# Altium schematic symbol library Transistor.SchLib: 61 symbols (part 2 of 2)
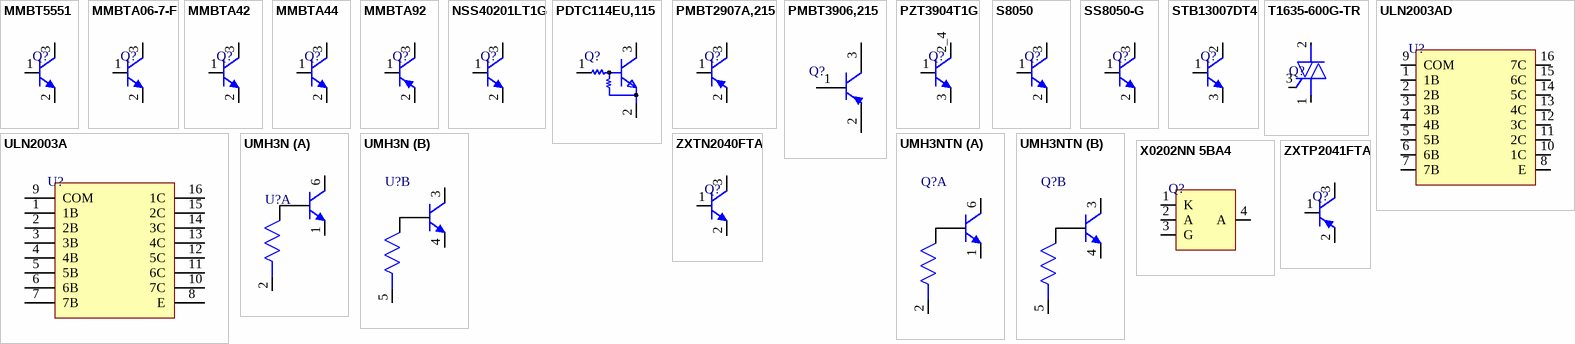
[diagram p2: symbols MMBT5551 to ZXTP2041FTA]

## MMBT5551
designator Q?
TRANS NPN 160V 0.6A SOT-23; Manufacturer: ON Semiconductor; Manufacturer Part Number: MMBT5551LT1G; Max Power Dissipation: 225mW; Max Collector Current: 600mA; Collector Base Voltage (VCBO): 180V; Emitter Base Voltage (VEBO): 6V; Element Configuration: Single; hFE Min: 80; Power Dissipation: 300mW; Number of Elements: 1; Collector Emitter Saturation Voltage: 150mV; Collector-emitter Voltage-Max: 200mV; Item Type: Transister; Supplier 1: Digi-Key; RoHS: Yes; Category: BJTs; Pricing 1: 1=0.22000, 10=0.17700, 100=0.09370, 500=0.06162, 1000=0.04190 (USD); Case/Package: SOT-23-3; Number of Pins: 3; Weight: 0.01lb; Contact Plating: Tin,Matte; Min Operating Temperature: -55°C; Max Operating Temperature: 150°C; Packaging: Tape and Reel; Collector Emitter Voltage (VCEO): 160V; Polarity: NPN; Package Quantity: 1; Collector Emitter Breakdown Voltage: 160V; Current Rating: 600mA; Voltage Rating (DC): 160V; Max Breakdown Voltage: 160V; Series: -; Length: 2.9mm; Width: 1.3mm; Height: 0.94mm; Radiation Hardening: No; Lead Free: Lead Free; REACH SVHC: No SVHC; RoHS Compliant: Yes; Supplier Part Number 1: MMBT5551LT1GOSDKR-ND; LCSC Part Number: C909756; ComponentLink14Description: LCSC; ComponentLink14URL: https://www.lcsc.com/product-detail/Bipolar-Transistors-BJT_Jiangsu-Changjing-Electronics-Technology-Co-Ltd-MMBT5551_C2145.html
footprint SOT-23 (TRANS NPN 40V 0.6A SOT23)
pins: 1 B, 2 E, 3 C

## MMBTA06-7-F
designator Q?
TRANS NPN 80V 0.5A SOT23-3; Manufacturer: Diodes; Manufacturer Part Number: MMBTA06-7-F; Item Type: BJTs; Current Rating: 500mA; Supplier: Future Electronics; LCSC Part Number: C151597; RoHS: Yes; Stock: 573000; Pricing: 3000=0.021, 9000=0.0202, 30000=0.0194, 60000=0.019, 120000=0.0182 (USD); Voltage Rating (DC): 80V; Lead Free: 5697LeadFree; ComponentLink1URL: https://datasheet.ciiva.com/19482/1540800-19482686.pdf?src-supplier=Jameco; ComponentLink1Description: https://datasheet.ciiva.com/19482/1540800-19482686.pdf?src-supplier=Jameco; ComponentLink2URL: https://datasheet.ciiva.com/15139/getdatasheetpartid-116057-15139325.pdf?src-supplier=Verical; ComponentLink2Description: https://datasheet.ciiva.com/15139/getdatasheetpartid-116057-15139325.pdf?src-supplier=Verical; ComponentLink3URL: https://datasheet.ciiva.com/972/ds30037-972971.pdf?src-supplier=Digikey; ComponentLink3Description: https://datasheet.ciiva.com/972/ds30037-972971.pdf?src-supplier=Digikey; ComponentLink4URL: https://datasheet.ciiva.com/972/ds30037-972972.pdf?src-supplier=Digikey; ComponentLink4Description: https://datasheet.ciiva.com/972/ds30037-972972.pdf?src-supplier=Digikey; ComponentLink5URL: https://datasheet.ciiva.com/972/ds30037-972973.pdf?src-supplier=Digikey; ComponentLink5Description: https://datasheet.ciiva.com/972/ds30037-972973.pdf?src-supplier=Digikey; ComponentLink6URL: https://datasheet.ciiva.com/11197/ds30037-11197413.pdf?src-supplier=Avnet; ComponentLink6Description: https://datasheet.ciiva.com/11197/ds30037-11197413.pdf?src-supplier=Avnet; ComponentLink7URL: https://datasheet.ciiva.com/4723/ds30037-4723212.pdf?src-supplier=Mouser; ComponentLink7Description: https://datasheet.ciiva.com/4723/ds30037-4723212.pdf?src-supplier=Mouser; ComponentLink8URL: https://datasheet.ciiva.com/22711/1915521-22711756.pdf?src-supplier=Element14; ComponentLink8Description: https://datasheet.ciiva.com/22711/1915521-22711756.pdf?src-supplier=Element14; ComponentLink9URL: https://datasheet.ciiva.com/16298/ds30037-16298441.pdf?src-supplier=Future+Electronics; ComponentLink9Description: https://datasheet.ciiva.com/16298/ds30037-16298441.pdf?src-supplier=Future+Electronics
footprint SOT-23 (TRANS NPN 40V 0.6A SOT23)
pins: 1 B, 2 E, 3 C

## MMBTA42
designator Q?
300V 350mW 100@10mA,10V 300mA NPN SOT-23 Bipolar Transistors - BJT ROHS; Manufacturer: Guangdong Hottech; Manufacturer Part Number: MMBTA42; Package: SOT-23; LCSC Part Number: C181172; Item Type: Transistor; ComponentLink1Description: LCSC; ComponentLink1URL: https://www.lcsc.com/product-detail/Bipolar-Transistors-BJT_Guangdong-Hottech-MMBTA42_C181172.html
footprint SOT-23 (TRANS NPN 40V 0.6A SOT23)
pins: 1 B, 2 E, 3 C

## MMBTA44
designator Q?
400V 350mW 300mA NPN SOT-23 Bipolar Transistors - BJT ROHS; Manufacturer: Foshan; Manufacturer Part Number: MMBTA44; Package: SOT-23; ComponentLink1Description: LCSC; ComponentLink1URL: https://lcsc.com/product-detail/Bipolar-Transistors-BJT_Foshan-Blue-Rocket-Elec-MMBTA44_C305465.html; LCSC Part Number: C9991
footprint sot-23
pins: 1 B, 2 E, 3 C

## MMBTA92
designator Q?
300V 300mW 100@10mA,10V 200mA PNP SOT-23 Bipolar Transistors - BJT ROHS; Manufacturer: Jiangsu; Manufacturer Part Number: MMBTA92; Package: SOT-23; LCSC Part Number: C8516; Item Type: Transistor; ComponentLink1Description: LCSC; ComponentLink1URL: https://www.lcsc.com/product-detail/Bipolar-Transistors-BJT_Jiangsu-Changjing-Electronics-Technology-Co-Ltd-MMBTA92_C8516.html
footprint SOT-23 (TRANS NPN 40V 0.6A SOT23)
pins: 1 B, 2 E, 3 C

## NSS40201LT1G
designator Q?
TRANS NPN 40V 2A SOT23-3; Manufacturer: ON Semiconductor; Manufacturer Part Number: NSS40201LT1G; Max Power Dissipation: 540mW; Transition Frequency: 150MHz; hFE Min: 200; Number of Elements: 1; Emitter Base Voltage (VEBO): 6V; Collector Emitter Saturation Voltage: 115mV; Element Configuration: Single; Clock Frequency: 100MHz; Item Type: Transistor; Supplier 1: Future Electronics; RoHS: Yes; Category: BJTs; Stock 1: 155; Pricing 1: 1=0.42000, 15=0.34000, 75=0.29500, 300=0.25500, 1500=0.21000 (USD); Case/Package: SOT-23-3; Pins: 3; Min Operating Temperature: -55°C; Max Operating Temperature: 150°C; Collector Emitter Voltage (VCEO): 40V; Packaging: Tape and Reel; Max Collector Current: 2A; Collector Emitter Breakdown Voltage: 40V; Polarity: NPN; Package Quantity: 3000; Frequency: 150MHz; Max Breakdown Voltage: 40V; Collector Base Voltage (VCBO): 40V; Power Dissipation: 540mW; Gain Bandwidth Product: 150MHz; Series: -; Collector-emitter Voltage-Max: 115mV; Length: 3.04mm; Width: 2.64mm; Height: 1.11mm; Radiation Hardening: No; Lead Free: Lead Free; Reach SVHC Compliant: Yes; Halogen Free: Halogen Free; RoHS Compliant: Yes; ComponentLink1URL: https://datasheet.ciiva.com/976/nss40201l-d-976800.pdf?src-supplier=Digi-Key; ComponentLink1Description: https://datasheet.ciiva.com/976/nss40201l-d-976800.pdf?src-supplier=Digi-Key; ComponentLink2URL: https://datasheet.ciiva.com/11204/nss40201l-d-11204882.pdf?src-supplier=Avnet; ComponentLink2Description: https://datasheet.ciiva.com/11204/nss40201l-d-11204882.pdf?src-supplier=Avnet; ComponentLink3URL: https://datasheet.ciiva.com/16291/nss40201l-d-115376-16291797.pdf?src-supplier=Mouser; ComponentLink3Description: https://datasheet.ciiva.com/16291/nss40201l-d-115376-16291797.pdf?src-supplier=Mouser; ComponentLink4URL: https://datasheet.ciiva.com/30480/0900766b8121b5a5-30480502.pdf?src-supplier=Rs; ComponentLink4Description: https://datasheet.ciiva.com/30480/0900766b8121b5a5-30480502.pdf?src-supplier=Rs; ComponentLink5URL: https://datasheet.ciiva.com/976/nss40201l-d-976801.pdf?src-supplier=Digi-Key; ComponentLink5Description: https://datasheet.ciiva.com/976/nss40201l-d-976801.pdf?src-supplier=Digi-Key; ComponentLink6URL: https://datasheet.ciiva.com/976/nss40201l-d-976802.pdf?src-supplier=Digi-Key; ComponentLink6Description: https://datasheet.ciiva.com/976/nss40201l-d-976802.pdf?src-supplier=Digi-Key; ComponentLink7URL: https://datasheet.ciiva.com/22641/nss40201l-d-22641179.pdf?src-supplier=Farnell; ComponentLink7Description: https://datasheet.ciiva.com/22641/nss40201l-d-22641179.pdf?src-supplier=Farnell; ComponentLink8URL: https://datasheet.ciiva.com/16222/nss40201l-d-16222093.pdf?src-supplier=Future+Electronics; ComponentLink8Description: https://datasheet.ciiva.com/16222/nss40201l-d-16222093.pdf?src-supplier=Future+Electronics; Supplier Part Number 1: 6030674; LCSC Part Number: C145175
footprint SOT-23 (TRANS NPN 40V 0.6A SOT23)
pins: 1 B, 2 E, 3 C

## PDTC114EU,115
designator Q?
TRANS PREBIAS NPN 50V SOT323; Manufacturer: Nexperia; Manufacturer Part Number: PDTC114EU,115; Item Type: BJTs; Polarity: 5054Direction; Collector Emitter Saturation Voltage: 150mV; Emitter Base Voltage (VEBO): 10V; Max Collector Current: 100mA; hFE Min: 30NUMBER; Number of Elements: 1NUMBER; Power Dissipation: 200mW; Supplier: Digikey; LCSC Part Number: C135830; RoHS: Yes; Stock: 130263; Pricing: 1=0.17, 10=0.101, 100=0.0624, 500=0.0453, 1000=0.03974 (USD); Pins: 3NUMBER; Max Operating Temperature: 150°C; Collector Emitter Voltage (VCEO): 50V; Collector Base Voltage (VCBO): 50V; Height: 1.1mm; ComponentLink1URL: http://www.farnell.com/datasheets/1511870.pdf?src-supplier=Farnell; ComponentLink1Description: http://www.farnell.com/datasheets/1511870.pdf?src-supplier=Farnell; ComponentLink2URL: https://datasheet.octopart.com/PDTC114EU%2C115-NXP-datasheet-539707.pdf?src-supplier=Future+Electronics; ComponentLink2Description: https://datasheet.octopart.com/PDTC114EU%2C115-NXP-datasheet-539707.pdf?src-supplier=Future+Electronics; ComponentLink3URL: https://assets.nexperia.com/documents/data-sheet/PDTC114E_SER.pdf?src-supplier=Digikey; ComponentLink3Description: https://assets.nexperia.com/documents/data-sheet/PDTC114E_SER.pdf?src-supplier=Digikey; ComponentLink4URL: https://datasheet.octopart.com/PDTC114EU%2C115-Nexperia-datasheet-24570111.pdf?src-supplier=Newark; ComponentLink4Description: https://datasheet.octopart.com/PDTC114EU%2C115-Nexperia-datasheet-24570111.pdf?src-supplier=Newark
footprint SOT-323-3
pins: 1 B, 2 E, 3 C

## PMBT2907A,215
designator Q?
TRANS PNP 60V 0.6A TO236AB; Manufacturer: Nexperia; Manufacturer Part Number: PMBT2907A,215; Collector Emitter Voltage (VCEO): -60V; Emitter Base Voltage (VEBO): -5V; Max Collector Current: -600mA; Polarity: 5054,5055Direction; Collector Emitter Saturation Voltage: -1.6V; hFE Min: 100NUMBER; Number of Elements: 1NUMBER; Power Dissipation: 250mW; Item Type: (BJT); Supplier: Arrow Electronics; LCSC Part Number: C8665; RoHS: Yes; Category: BJTs; Stock: 441000; Pricing: 3000=0.018, 9000=0.017, 24000=0.016, 45000=0.015 (USD); Pins: 3NUMBER; Max Operating Temperature: 150°C; Collector Base Voltage (VCBO): -60V; Packaging: 10Packaging; Height: 1.1mm; ComponentLink1URL: https://media.digikey.com/pdf/Data%20Sheets/NXP%20PDFs/PMBT2907(A).pdf?src-supplier=Digikey; ComponentLink1Description: https://media.digikey.com/pdf/Data%20Sheets/NXP%20PDFs/PMBT2907(A).pdf?src-supplier=Digikey; ComponentLink2URL: http://www.farnell.com/datasheets/1914007.pdf?src-supplier=Farnell; ComponentLink2Description: http://www.farnell.com/datasheets/1914007.pdf?src-supplier=Farnell; ComponentLink3URL: https://datasheet.octopart.com/PMBT2907A%2C215-Nexperia-datasheet-87581832.pdf?src-supplier=Future+Electronics; ComponentLink3Description: https://datasheet.octopart.com/PMBT2907A%2C215-Nexperia-datasheet-87581832.pdf?src-supplier=Future+Electronics; ComponentLink4URL: https://datasheet.octopart.com/PMBT2907A%2C215-Nexperia-datasheet-38276499.pdf?src-supplier=Newark; ComponentLink4Description: https://datasheet.octopart.com/PMBT2907A%2C215-Nexperia-datasheet-38276499.pdf?src-supplier=Newark
footprint SOT-23 (TRANS NPN 40V 0.6A SOT23)
pins: 1 B, 2 E, 3 C

## PMBT3906,215
designator Q?
50nA 40V 250mW 100@10mA,1V 200mA 250MHz 400mV@50mA,5mA PNP +150℃@(Tj) SOT-23 Bipolar Transistors - BJT ROHS; Manufacturer: Nexperia; Manufacturer Part Number: PMBT3906,215; Package Body Material: Plastic; Transistor Element Material: SILICON; Collector-base Capacitance-Max: 4.5pF; DC Current Gain-Min (hFE): 30; Number of Elements: 1; Time @ Peak Reflow Temperature-Max (s): 40s; Transistor Application: SWITCHING; Turn-off Time-Max (toff): 300ns; Turn-on Time-Max (ton): 70ns; VCEsat-Max: 650mV; Reference Standard: IEC-60134; JEDEC-95 Code: TO-236AB; Qualification Status: Not Qualified; Supplier 1: Arrow Electronics; RoHS: Yes; Category: BJTs; Stock 1: 1869000; Pricing 1: 3000=0.01910, 6000=0.01620, 12000=0.01260 (USD); Pins: 3; Package Shape: Rectangular; Terminal Finish: Tin; Max Operating Temperature: 150°C; JESD-609 Code: e3; Polarity/Channel Type: PNP; Max Collector Current: 200mA; Collector-emitter Voltage-Max: 40V; JESD-30 Code: R-PDSO-G3; Moisture Sensitivity Level: 1; Package Style: SMALL OUTLINEMeter; Peak Reflow Temperature (Cel): 260°C; Surface Mount: Yes; Terminal Form: Gull Wing; Terminal Position: DUAL; Frequency: 250MHz; Reach SVHC Compliant: Yes; RoHS Compliant: Yes; ComponentLink1URL: https://datasheet.ciiva.com:443/pdfs/VipMasterIC/IC/NEXP/NEXP-S-A0003512970/NEXP-S-A0003512970-1.pdf?src-supplier=IHS+Markit; ComponentLink1Description: https://datasheet.ciiva.com:443/pdfs/VipMasterIC/IC/NEXP/NEXP-S-A0003512970/NEXP-S-A0003512970-1.pdf?src-supplier=IHS+Markit; ComponentLink2URL: http://www.farnell.com/datasheets/1499182.pdf?src-supplier=Farnell; ComponentLink2Description: http://www.farnell.com/datasheets/1499182.pdf?src-supplier=Farnell; ComponentLink3URL: https://assets.nexperia.com/documents/data-sheet/PMBT3906.pdf?src-supplier=Digi-Key; ComponentLink3Description: https://assets.nexperia.com/documents/data-sheet/PMBT3906.pdf?src-supplier=Digi-Key; ComponentLink4URL: http://www.farnell.com/datasheets/1499182.pdf?src-supplier=Newark; ComponentLink4Description: http://www.farnell.com/datasheets/1499182.pdf?src-supplier=Newark; Supplier Part Number 1: PMBT3906,215; LCSC Part Number: C8670; Item Type: SOT-23
footprint SOT-23 (TRANS NPN 40V 0.6A SOT23)
pins: 1 B, 2 E, 3 C

## PZT3904T1G
designator Q?
TRANS NPN 40V 0.2A SOT223; Manufacturer: ON Semiconductor; Manufacturer Part Number: PZT3904T1G; Item Type: BJTs; Max Power Dissipation: 1.5W; Frequency: 300MHz; Number of Elements: 1; hFE Min: 40; Max Collector Current: 200mA; Collector Base Voltage (VCBO): 60V; Emitter Base Voltage (VEBO): 6V; Collector Emitter Saturation Voltage: 300mV; Supplier: Future Electronics; LCSC Part Number: C232396; RoHS: Yes; Stock: 53000; Pricing: 1000=0.103, 3000=0.0988, 5000=0.0968, 10000=0.0942, 20000=0.0902 (USD); Case/Package: SOT-223-4; Pins: 4; Min Operating Temperature: -55°C; Max Operating Temperature: 150°C; Collector Emitter Voltage (VCEO): 40V; Package Quantity: 1000; Packaging: Tape and Reel; Transition Frequency: 300MHz; Polarity: NPN; Collector Emitter Breakdown Voltage: 40V; Max Breakdown Voltage: 40V; Power Dissipation: 1.5W; Clock Frequency: 300MHz; Gain Bandwidth Product: 300MHz; Voltage Rating (DC): 40V; Current Rating: 200mA; Collector-emitter Voltage-Max: 300mV; Series: -; Length: 6.7mm; Width: 3.7mm; Height: 1.65mm; Radiation Hardening: No; Reach SVHC Compliant: No; Lead Free: Lead Free; RoHS Compliant: Yes; ComponentLink1URL: http://www.farnell.com/datasheets/1750729.pdf?src-supplier=Farnell; ComponentLink1Description: http://www.farnell.com/datasheets/1750729.pdf?src-supplier=Farnell; ComponentLink2URL: http://www.farnell.com/datasheets/1750729.pdf?src-supplier=Newark; ComponentLink2Description: http://www.farnell.com/datasheets/1750729.pdf?src-supplier=Newark; ComponentLink3URL: http://www.farnell.com/datasheets/1750729.pdf?src-supplier=Element14; ComponentLink3Description: http://www.farnell.com/datasheets/1750729.pdf?src-supplier=Element14; ComponentLink4URL: https://datasheet.octopart.com/PZT3904T1G-ON-Semiconductor-datasheet-21211214.pdf?src-supplier=Farnell; ComponentLink4Description: https://datasheet.octopart.com/PZT3904T1G-ON-Semiconductor-datasheet-21211214.pdf?src-supplier=Farnell; ComponentLink5URL: http://www.farnell.com/datasheets/2058184.pdf?src-supplier=Element14; ComponentLink5Description: http://www.farnell.com/datasheets/2058184.pdf?src-supplier=Element14
footprint PZT3904T1G
pins: 1 B, 2_4 C, 3 E

## S8050
designator Q?
Trans Gp Bjt NPN 25V 1.5A 300MW 3-PIN SOT-23 T/r; Manufacturer: Comchip; Manufacturer Part Number: SS8050-G; Collector Emitter Voltage (VCEO): 400mV; Transition Frequency: 100MHz; Item Type: Transistor; Supplier 1: Arrow Electronics; RoHS: Yes; Stock 1: 2514; Pricing 1: 1=0.26480, 10=0.19960, 25=0.19760, 50=0.19590, 100=0.09990, 250=0.09890, 500=0.07670, 1000=0.05180 (USD); Mount: Surface Mount; Case/Package: TO-236-3; Packaging: Tape and Reel; Max Power Dissipation: 300mW; Max Collector Current: 1.5A; Collector Emitter Breakdown Voltage: 25V; Max Breakdown Voltage: 25V; ComponentLink1URL: http://www.comchiptech.com/admin/files/product/SS8050-G RevA181526.pdf?src-supplier=Digi-Key; ComponentLink1Description: http://www.comchiptech.com/admin/files/product/SS8050-G RevA181526.pdf?src-supplier=Digi-Key; ComponentLink2URL: http://www.comchiptech.com/cms/UserFiles/SS8050-G%20RevA181526.pdf?src-supplier=Digi-Key; ComponentLink2Description: http://www.comchiptech.com/cms/UserFiles/SS8050-G%20RevA181526.pdf?src-supplier=Digi-Key; Supplier Part Number 1: SS8050-G; LCSC Part Number: C105433
footprint SOT-23 (TRANS NPN 40V 0.6A SOT23)
pins: 1 B, 2 E, 3 C

## SS8050-G
designator Q?
25V 300mW 120@100mA,1V 1.5A NPN SOT-23 Bipolar Transistors - BJT ROHS; Manufacturer: Jiangsu Changjing Electronics Technology; Manufacturer Part Number: SS8050-G; Package: SOT-23; LCSC Part Number: C164886; Itype Type: Transistor; ComponentLink1Description: LCSC; ComponentLink1URL: https://www.lcsc.com/product-detail/Bipolar-Transistors-BJT_Jiangsu-Changjing-Electronics-Technology-Co-Ltd-SS8050-G_C164886.html
footprint SOT-23 (TRANS NPN 40V 0.6A SOT23)
pins: 1 B, 2 E, 3 C

## STB13007DT4
designator Q?
TRANS NPN 400V 8A D2PAK; Manufacturer: STMicroelectronics; Manufacturer Part Number: STB13007DT4; Item Type: BJTs; Supplier: Arrow Electronics; LCSC Part Number: C500928; RoHS: Yes; Stock: 1694; Pricing: 1=1.5973, 10=1.0989, 25=1.0879, 100=0.7233, 250=0.7161, 500=0.6025, 1000=0.4613 (USD); ComponentLink1URL: https://datasheet.ciiva.com/22733/1689954-22733255.pdf?src-supplier=Element14; ComponentLink1Description: https://datasheet.ciiva.com/22733/1689954-22733255.pdf?src-supplier=Element14; ComponentLink2URL: https://datasheet.ciiva.com/977/cd00116674-977035.pdf?src-supplier=Digikey; ComponentLink2Description: https://datasheet.ciiva.com/977/cd00116674-977035.pdf?src-supplier=Digikey; ComponentLink3URL: https://datasheet.ciiva.com/977/cd00116674-977036.pdf?src-supplier=Digikey; ComponentLink3Description: https://datasheet.ciiva.com/977/cd00116674-977036.pdf?src-supplier=Digikey; ComponentLink4URL: https://datasheet.ciiva.com/977/cd00116674-977037.pdf?src-supplier=Digikey; ComponentLink4Description: https://datasheet.ciiva.com/977/cd00116674-977037.pdf?src-supplier=Digikey; ComponentLink5URL: https://datasheet.ciiva.com/11198/cd00116674-11198854.pdf?src-supplier=Avnet; ComponentLink5Description: https://datasheet.ciiva.com/11198/cd00116674-11198854.pdf?src-supplier=Avnet; ComponentLink6URL: https://datasheet.ciiva.com/16490/cd00116674-16490093.pdf?src-supplier=Future+Electronics; ComponentLink6Description: https://datasheet.ciiva.com/16490/cd00116674-16490093.pdf?src-supplier=Future+Electronics; ComponentLink7URL: https://datasheet.ciiva.com/4722/cd00116674-4722268.pdf?src-supplier=Mouser; ComponentLink7Description: https://datasheet.ciiva.com/4722/cd00116674-4722268.pdf?src-supplier=Mouser
footprint D2PAK
pins: 1 B, 2 C, 3 E

## T1635-600G-TR
designator Q?
TRIAC ALTERNISTOR 600V 16A D2PAK; Manufacturer: STMicroelectronics; Manufacturer Part Number: T1635-600G-TR; Item Type: TRIACs; Peak Non-Repetitive Surge Current: 160A; Supplier: Future Electronics; LCSC Part Number: C37520; RoHS: Yes; Stock: 107000; Pricing: 1000=0.43, 2000=0.42, 4000=0.41, 5000=0.41, 15000=0.395 (USD); Current Rating: 16A; Voltage Rating (DC): 600V; Height: 4.83mm; Lead Free: 5697LeadFree; ComponentLink1URL: https://datasheet.ciiva.com/34303/2001752-34303742.pdf?src-supplier=Jameco; ComponentLink1Description: https://datasheet.ciiva.com/34303/2001752-34303742.pdf?src-supplier=Jameco; ComponentLink2URL: https://datasheet.ciiva.com/4749/cd00002265-4749094.pdf?src-supplier=Mouser; ComponentLink2Description: https://datasheet.ciiva.com/4749/cd00002265-4749094.pdf?src-supplier=Mouser; ComponentLink3URL: https://datasheet.ciiva.com/16290/cd00002265-16290333.pdf?src-supplier=Future+Electronics; ComponentLink3Description: https://datasheet.ciiva.com/16290/cd00002265-16290333.pdf?src-supplier=Future+Electronics
footprint TO-263AB
pins: 1 M1, 2 M2, 3 G

## ULN2003A
designator U?
100uA@50V 3V@2V,300mA 1.6V@350mA 4mA@12V 100uA@50V 1.25V@350mA 500mA 25pF SOP-16_150mil Darlington Transistor Arrays ROHS; Manufacturer: Mixic; Manufacturer Part Number: ULN2003A; Item Type: IC; Package: SOP-16_150mil; LCSC Part Number: C181730; ComponentLink1Description: LCSC; ComponentLink1URL: https://www.lcsc.com/product-detail/Darlington-Transistor-Arrays_Mixic-ULN2003A_C181730.html
footprint SOP-16_150mil
pins: 1 1B, 2 2B, 3 3B, 4 4B, 5 5B, 6 6B, 7 7B, 8 E, 9 COM, 10 7C, 11 6C, 12 5C, 13 4C, 14 3C, 15 2C, 16 1C

## ULN2003AD
designator U?
TRANS 7NPN DARL 50V 0.5A 16SOIC; Manufacturer: Texas Instruments; Manufacturer Part Number: ULN2003AD; Max Collector Current: 500mA; Number of Elements: 7; Polarity: NPN; Collector Emitter Saturation Voltage: 1.1V; Collector-emitter Voltage-Max: 1.6V; Max Power Dissipation: 25W; Item Type: IC; Supplier 1: Arrow Electronics; RoHS: Yes; Category: Integrated Circuits (ICs); Stock 1: 228; Pricing 1: 1=1.68680, 10=1.54200, 100=1.39890, 500=1.31050, 1000=1.23410 (USD); Mount: Surface Mount; Case/Package: SOIC; Number of Pins: 16; Weight: 0.004998oz; Contact Plating: Gold; Min Operating Temperature: -20°C; Max Operating Temperature: 70°C; Packaging: Rail/Tube; Collector Emitter Voltage (VCEO): 50V; Package Quantity: 40; Series: Automotive, AEC-Q100; Number of Drivers: 7; Collector Emitter Breakdown Voltage: 50V; Voltage Rating (DC): 50V; Current Rating: 500mA; Emitter Base Voltage (VEBO): 50V; Output Current: 500mA; Length: 9.9mm; Width: 3.91mm; Height: 1.58mm; Radiation Hardening: No; Lead Free: Lead Free; RoHS Compliant: Yes; Reach SVHC Compliant: Yes; ComponentLink1URL: https://datasheet.ciiva.com/15139/getdatasheetpartid-47909-15139875.pdf?src-supplier=Verical; ComponentLink1Description: https://datasheet.ciiva.com/15139/getdatasheetpartid-47909-15139875.pdf?src-supplier=Verical; ComponentLink2URL: https://datasheet.ciiva.com/1193/1908148-1193405.pdf?src-supplier=Element14; ComponentLink2Description: https://datasheet.ciiva.com/1193/1908148-1193405.pdf?src-supplier=Element14; ComponentLink3URL: https://datasheet.ciiva.com/1702/uln2003a-1702173.pdf?src-supplier=Digi-Key; ComponentLink3Description: https://datasheet.ciiva.com/1702/uln2003a-1702173.pdf?src-supplier=Digi-Key; ComponentLink4URL: https://datasheet.ciiva.com/14424/ulq2003a-14424058.pdf?src-supplier=Avnet; ComponentLink4Description: https://datasheet.ciiva.com/14424/ulq2003a-14424058.pdf?src-supplier=Avnet; Supplier Part Number 1: ULN2003AD; LCSC Part Number: C908113
footprint 16-SOIC
pins: 1 1B, 2 2B, 3 3B, 4 4B, 5 5B, 6 6B, 7 7B, 8 E, 9 COM, 10 1C, 11 2C, 12 3C, 13 4C, 14 5C, 15 6C, 16 7C

## UMH3N
designator U?
2 NPN pre-biased (Dual) 150mW 100mA 50V SC-70-6(SOT-363) Digital Transistors ROHS; Manufacturer: Changjiang; Manufacturer Part Number: UMH3N; Footprint: SC-70-6(SOT-363); ComponentLink1Description: LCSC; ComponentLink1URL: https://www.lcsc.com/product-detail/Digital-Transistors_Jiangsu-Changjing-Electronics-Technology-Co-Ltd-UMH3N_C62892.html; LCSC Part Number: C62892; Item Type: Transistor
footprint SC-70-6_
part A pins: 1 E, 2, 6 C
part B pins: 3 C, 4 E, 5

## UMH3NTN
designator Q?
TRANS 2NPN PREBIAS 0.15W UMT6; Manufacturer: Rohm; Manufacturer Part Number: UMH3NTN; Collector Emitter Voltage (VCEO): 50V; Emitter Base Voltage (VEBO): 5V; Max Collector Current: 100mA; Element Configuration: Dual; hFE Min: 100; Polarity: NPN; Power Dissipation: 150mW; Transition Frequency: 250MHz; Item Type: Transistor; Supplier 1: Digi-Key; Stock 1: 12797; Pricing 1: 1=0.39, 10=0.293, 25=0.264, 100=0.1392, 500=0.12336, 1000=0.096 (USD); Mount: Surface Mount; Case/Package: SOT-363; Number of Pins: 6; Min Operating Temperature: -55°C; Max Operating Temperature: 150°C; Max Output Current: 100mA; Operating Supply Voltage: 50V; Packaging: Tape and Reel; Package Quantity: 1; Continuous Collector Current: 100mA; Collector Emitter Breakdown Voltage: 50V; Max Power Dissipation: 150mW; Max Breakdown Voltage: 50V; Voltage Rating (DC): 50V; Current Rating: 100mA; Collector Base Voltage (VCBO): 50V; Radiation Hardening: No; REACH SVHC: No SVHC; Lead Free: Lead Free; ComponentLink1URL: http://www.farnell.com/datasheets/1645293.pdf?src-supplier=Element14; ComponentLink1Description: http://www.farnell.com/datasheets/1645293.pdf?src-supplier=Element14; ComponentLink2URL: http://rohmfs.rohm.com/en/products/databook/datasheet/discrete/transistor/digital/emh3t2r-e.pdf?src-supplier=Digi-Key; ComponentLink2Description: http://rohmfs.rohm.com/en/products/databook/datasheet/discrete/transistor/digital/emh3t2r-e.pdf?src-supplier=Digi-Key; ComponentLink3URL: http://rohmfs.rohm.com/en/techdata_basic/transistor/taping/UMT6_TN_taping.pdf?src-supplier=Digi-Key; ComponentLink3Description: http://rohmfs.rohm.com/en/techdata_basic/transistor/taping/UMT6_TN_taping.pdf?src-supplier=Digi-Key; ComponentLink4URL: http://www.produktinfo.conrad.com/datenblaetter/125000-149999/140593-da-01-en-TRANSISTOR_UMH3_NTN_SOT_363.pdf?src-supplier=Conrad; ComponentLink4Description: http://www.produktinfo.conrad.com/datenblaetter/125000-149999/140593-da-01-en-TRANSISTOR_UMH3_NTN_SOT_363.pdf?src-supplier=Conrad; Supplier Part Number 1: UMH3NTNCT-ND; LCSC Part Number: C123008
footprint UMT6 (Dual Digital Transistors)
part A pins: 1 E, 2, 6 C
part B pins: 3 C, 4 E, 5

## X0202NN 5BA4
designator Q?
SCR 800V 1.25A SOT223; Manufacturer: STMicroelectronics; Manufacturer Part Number: X0202NN 5BA4; Item Type: SCRs; Current Rating: 800mA; Hold Current: 5mA; Leakage Current: 500µA; Number of Contacts: 3; Number of Elements: 1; Supplier: Arrow Electronics; LCSC Part Number: C222164; RoHS: Compliant; Stock: 26000; Pricing: 1000=0.1625, 2000=0.152, 3000=0.15, 5000=0.103, 7000=0.102, 10000=0.099, 25000=0.098 (USD); Case/Package: SOT-223; China RoHS: Non-Compliant; Height: 1.8mm; Lead Free: Lead Free; Length: 6.7mm; Lifecycle Status: Production; Max Operating Temperature: 125°C; Max Repetitive Reverse Voltage (Vrrm): 800V; Min Operating Temperature: -40°C; Mounting Technology: Surface Mount; Pins: 3; Number of Terminals: 4; Radiation Hardening: No; REACH SVHC: No; RMS Current (Irms): 1.25A; Schedule B: 8541300080, 8541300080|8541300080|8541300080|8541300080|8541300080; Termination: SMD/SMT; Voltage Rating (DC): 800V; Width: 3.7mm; ComponentLink1URL: https://datasheet.octopart.com:443/X0202NN-5BA4-STMicroelectronics-datasheet-10407941.pdf?src-supplier=element14+APAC; ComponentLink1Description: https://datasheet.octopart.com:443/X0202NN-5BA4-STMicroelectronics-datasheet-10407941.pdf?src-supplier=element14+APAC; ComponentLink2URL: https://datasheet.octopart.com:443/X0202NN-5BA4-STMicroelectronics-datasheet-21815840.pdf?src-supplier=element14+APAC; ComponentLink2Description: https://datasheet.octopart.com:443/X0202NN-5BA4-STMicroelectronics-datasheet-21815840.pdf?src-supplier=element14+APAC; ComponentLink3URL: https://datasheet.octopart.com:443/X0202NN-5BA4-STMicroelectronics-datasheet-22136608.pdf?src-supplier=STMicroelectronics; ComponentLink3Description: https://datasheet.octopart.com:443/X0202NN-5BA4-STMicroelectronics-datasheet-22136608.pdf?src-supplier=STMicroelectronics; ComponentLink4URL: https://datasheet.octopart.com:443/X0202NN-5BA4-STMicroelectronics-datasheet-8604.pdf?src-supplier=Farnell; ComponentLink4Description: https://datasheet.octopart.com:443/X0202NN-5BA4-STMicroelectronics-datasheet-8604.pdf?src-supplier=Farnell
footprint SOT- 223
pins: 1 K, 2 A, 3 G, 4 A

## ZXTN2040FTA
designator Q?
TRANS NPN 40V 1A SOT23-3; Manufacturer: Diodes Zetex; Manufacturer Part Number: ZXTN2040FTA; Item Type: BJTs; Supplier: Digikey; LCSC Part Number: C460141; RoHS: Yes; Stock: 9989; Pricing: 1=0.38, 10=0.258, 100=0.1744, 500=0.13526, 1000=0.12224 (USD); ComponentLink1URL: https://datasheet.ciiva.com/973/zxtn2040f-973922.pdf?src-supplier=Digikey; ComponentLink1Description: https://datasheet.ciiva.com/973/zxtn2040f-973922.pdf?src-supplier=Digikey; ComponentLink2URL: https://datasheet.ciiva.com/17037/0900766b80d2efd3-17037010.pdf?src-supplier=Allied+Electronics; ComponentLink2Description: https://datasheet.ciiva.com/17037/0900766b80d2efd3-17037010.pdf?src-supplier=Allied+Electronics; ComponentLink3URL: https://datasheet.ciiva.com/15139/getdatasheetpartid-76608-15139038.pdf?src-supplier=Verical; ComponentLink3Description: https://datasheet.ciiva.com/15139/getdatasheetpartid-76608-15139038.pdf?src-supplier=Verical; ComponentLink4URL: https://datasheet.ciiva.com/973/zxtn2040f-973923.pdf?src-supplier=Digikey; ComponentLink4Description: https://datasheet.ciiva.com/973/zxtn2040f-973923.pdf?src-supplier=Digikey; ComponentLink5URL: https://datasheet.ciiva.com/973/zxtn2040f-973924.pdf?src-supplier=Digikey; ComponentLink5Description: https://datasheet.ciiva.com/973/zxtn2040f-973924.pdf?src-supplier=Digikey; ComponentLink6URL: https://datasheet.ciiva.com/11201/zxtn2040f-11201581.pdf?src-supplier=Avnet; ComponentLink6Description: https://datasheet.ciiva.com/11201/zxtn2040f-11201581.pdf?src-supplier=Avnet; ComponentLink7URL: https://datasheet.ciiva.com/11206/zxtn2040f-11206668.pdf?src-supplier=Avnet; ComponentLink7Description: https://datasheet.ciiva.com/11206/zxtn2040f-11206668.pdf?src-supplier=Avnet; ComponentLink8URL: https://datasheet.ciiva.com/16508/zxtn2040f-16508997.pdf?src-supplier=Future+Electronics; ComponentLink8Description: https://datasheet.ciiva.com/16508/zxtn2040f-16508997.pdf?src-supplier=Future+Electronics
footprint SOT-23 (TRANS NPN 40V 0.6A SOT23)
pins: 1 B, 2 E, 3 C

## ZXTP2041FTA
designator Q?
TRANS PNP 40V 1A SOT23-3; Manufacturer: Diodes Zetex; Manufacturer Part Number: ZXTP2041FTA; Item Type: BJTs; Supplier: Digikey; LCSC Part Number: C443628; RoHS: Yes; Stock: 1455; Pricing: 1=0.31, 10=0.211, 100=0.1422, 500=0.10978, 1000=0.09893 (USD); ComponentLink1URL: https://datasheet.ciiva.com/11201/zxtp2041f-11201510.pdf?src-supplier=Avnet; ComponentLink1Description: https://datasheet.ciiva.com/11201/zxtp2041f-11201510.pdf?src-supplier=Avnet; ComponentLink2URL: https://datasheet.ciiva.com/973/zxtp2041f-973920.pdf?src-supplier=Digikey; ComponentLink2Description: https://datasheet.ciiva.com/973/zxtp2041f-973920.pdf?src-supplier=Digikey; ComponentLink3URL: https://datasheet.ciiva.com/16217/zxtp2041f-16217884.pdf?src-supplier=Future+Electronics; ComponentLink3Description: https://datasheet.ciiva.com/16217/zxtp2041f-16217884.pdf?src-supplier=Future+Electronics; ComponentLink4URL: https://datasheet.ciiva.com/973/zxtp2041f-973919.pdf?src-supplier=Digikey; ComponentLink4Description: https://datasheet.ciiva.com/973/zxtp2041f-973919.pdf?src-supplier=Digikey; ComponentLink5URL: https://datasheet.ciiva.com/973/zxtp2041f-973921.pdf?src-supplier=Digikey; ComponentLink5Description: https://datasheet.ciiva.com/973/zxtp2041f-973921.pdf?src-supplier=Digikey
footprint SOT-23 (TRANS NPN 40V 0.6A SOT23)
pins: 1 B, 2 E, 3 C